# Altium integrated library StudentsLibrary.IntLib: 806 symbols (part 9 of 10)
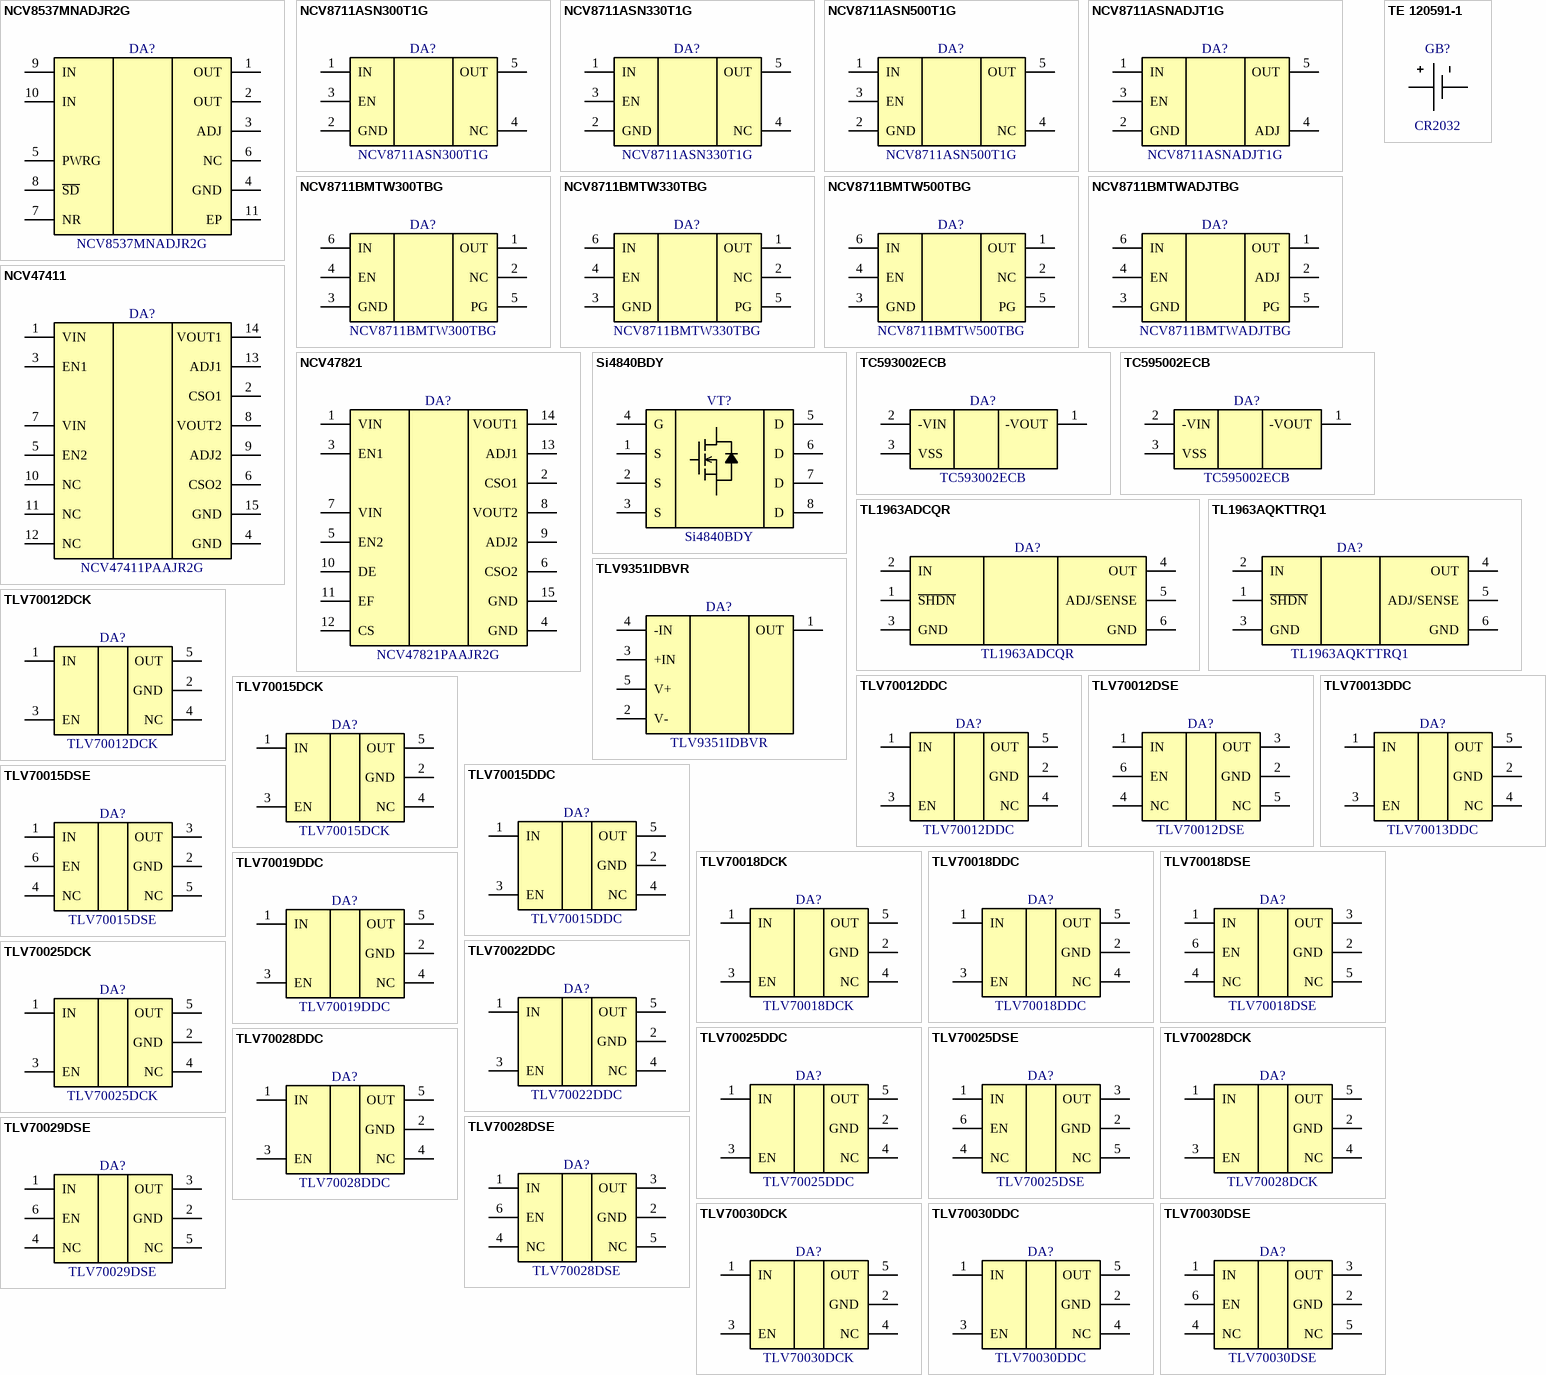
[diagram p55: symbols NCV8537MNADJR2G to TLV70030DSE]

## TE 120591-1
designator GB?, comment CR2032
Battery Holder, CR2032, Horizontal, Tin, PCB Mount Alignment; PartNumber: 120591-1; Manufacturer: TE Connectivity; BatteryType: CR2032; ComponentLink1Description: Product Page; ComponentLink1URL: https://www.te.com/usa-en/product-120591-1.html; ComponentLink2Description: DataSheet; ComponentLink2URL: https://www.te.com/usa-en/product-120591-1.datasheet.pdf
footprint TE 120591-1 (Lithium Battery Holder, CR2032, 2 Position, Horizontal, Tin, PCB Mount Alignment)
pins: 1, 2

## TL1963ADCQR
designator DA?
1.5-A, 20-V, low-dropout voltage regulator with reverse current & reverse voltage protection, Adj., SOT-223; Manufacturer: Texas Instruments; PartNumber: TL1963ADCQR; ComponentLink1Description: Product Page; ComponentLink1URL: https://www.ti.com/product/TL1963A; ComponentLink2Description: DataSheet; ComponentLink2URL: https://www.ti.com/lit/gpn/tl1963a
footprint SOT223-6P127_706X180L102X46N (Small Outline Transistor (SOT223), 1.27 mm pitch; 6 pin, 6.50 mm L X 3.50 mm W X 1.80 mm H body)
pins: 1 ~{SHDN}, 2 IN, 3 GND, 4 OUT, 5 ADJ/SENSE, 6 GND

## TL1963AQKTTRQ1
designator DA?
1.5-A Low-Noise Fast-Transient-Response Low-Dropout Regulator; Manufacturer: Texas Instruments; PartNumber: TL1963AQKTTRQ1; ComponentLink1Description: Product Page; ComponentLink1URL: https://www.ti.com/product/TL1963A-Q1; ComponentLink2Description: DataSheet; ComponentLink2URL: https://www.ti.com/lit/gpn/tl1963a-q1
footprint DPAK170P1525X485-6N (D2-PAK, 6-Pads, Body 7,93x8,71mm (max), IPC Medium Density)
pins: 1 ~{SHDN}, 2 IN, 3 GND, 4 OUT, 5 ADJ/SENSE, 6 GND

## TLV9351IDBVR
designator DA?
3.5-MHz, 40-V, RRO, MUX-Friendly Operational Amplifier / for Cost-Sensitive Systems, SOT-23; Manufacturer: Texas Instruments; PartNumber: TLV9351IDBVR; ComponentLink1Description: Product Page; ComponentLink1URL: https://www.ti.com/product/TLV9351; ComponentLink2Description: DataSheet; ComponentLink2URL: https://www.ti.com/lit/gpn/tlv9351
footprint SOT23-5P95_280X145L45X40N (Small Outline Transistor (SOT23), 0.95 mm pitch; 5 pin, 2.90 mm L X 1.60 mm W X 1.45 mm H body)
pins: 1 OUT, 2 V-, 3 +IN, 4 -IN, 5 V+

## TLV70012DCK
designator DA?
200-mA,Low-IQ, Low-Dropout Regulator for Portable Devices, Fixed 1.2 V, SC70; Manufacturer: Texas Instruments; PartNumber: TLV70012DCK; ComponentLink1Description: Product Page; ComponentLink1URL: https://www.ti.com/product/TLV700; ComponentLink2Description: DataSheet; ComponentLink2URL: https://www.ti.com/lit/gpn/tlv700
footprint SOT23-5P65_210X110L36X22N (Small Outline Transistor (SOT23), 0.65 mm pitch; 5 pin, 2.00 mm L X 1.25 mm W X 1.10 mm H body)
pins: 1 IN, 2 GND, 3 EN, 4 NC, 5 OUT

## TLV70012DDC
designator DA?
200-mA,Low-IQ, Low-Dropout Regulator for Portable Devices, Fixed 1.2 V, SOT-23-THIN; Manufacturer: Texas Instruments; PartNumber: TLV70012DDC; ComponentLink1Description: Product Page; ComponentLink1URL: https://www.ti.com/product/TLV700; ComponentLink2Description: DataSheet; ComponentLink2URL: https://www.ti.com/lit/gpn/tlv700
footprint SOT23-5P95_280X110L45X40N (Small Outline Transistor (SOT23), 0.95 mm pitch; 5 pin, 2.90 mm L X 1.60 mm W X 1.10 mm H body)
pins: 1 IN, 2 GND, 3 EN, 4 NC, 5 OUT

## TLV70012DSE
designator DA?
200-mA,Low-IQ, Low-Dropout Regulator for Portable Devices, Fixed 1.2 V, WSON-6; Manufacturer: Texas Instruments; PartNumber: TLV70012DSE; ComponentLink1Description: Product Page; ComponentLink1URL: https://www.ti.com/product/TLV700; ComponentLink2Description: DataSheet; ComponentLink2URL: https://www.ti.com/lit/gpn/tlv700
footprint SON6P50_150X150X80L50X25N (Small Outline No-Lead (SON), 0.50 mm pitch; 6 pin, 1.50 mm L X 1.50 mm W X 0.80 mm H body)
pins: 1 IN, 2 GND, 3 OUT, 4 NC, 5 NC, 6 EN

## TLV70013DDC
designator DA?
200-mA,Low-IQ, Low-Dropout Regulator for Portable Devices, Fixed 1.3 V, SOT-23-THIN; Manufacturer: Texas Instruments; PartNumber: TLV70013DDC; ComponentLink1Description: Product Page; ComponentLink1URL: https://www.ti.com/product/TLV700; ComponentLink2Description: DataSheet; ComponentLink2URL: https://www.ti.com/lit/gpn/tlv700
footprint SOT23-5P95_280X110L45X40N (Small Outline Transistor (SOT23), 0.95 mm pitch; 5 pin, 2.90 mm L X 1.60 mm W X 1.10 mm H body)
pins: 1 IN, 2 GND, 3 EN, 4 NC, 5 OUT

## TLV70015DCK
designator DA?
200-mA,Low-IQ, Low-Dropout Regulator for Portable Devices, Fixed 1.5 V, SC70; Manufacturer: Texas Instruments; PartNumber: TLV70015DCK; ComponentLink1Description: Product Page; ComponentLink1URL: https://www.ti.com/product/TLV700; ComponentLink2Description: DataSheet; ComponentLink2URL: https://www.ti.com/lit/gpn/tlv700
footprint SOT23-5P65_210X110L36X22N (Small Outline Transistor (SOT23), 0.65 mm pitch; 5 pin, 2.00 mm L X 1.25 mm W X 1.10 mm H body)
pins: 1 IN, 2 GND, 3 EN, 4 NC, 5 OUT

## TLV70015DDC
designator DA?
200-mA,Low-IQ, Low-Dropout Regulator for Portable Devices, Fixed 1.5 V, SOT-23-THIN; Manufacturer: Texas Instruments; PartNumber: TLV70015DDC; ComponentLink1Description: Product Page; ComponentLink1URL: https://www.ti.com/product/TLV700; ComponentLink2Description: DataSheet; ComponentLink2URL: https://www.ti.com/lit/gpn/tlv700
footprint SOT23-5P95_280X110L45X40N (Small Outline Transistor (SOT23), 0.95 mm pitch; 5 pin, 2.90 mm L X 1.60 mm W X 1.10 mm H body)
pins: 1 IN, 2 GND, 3 EN, 4 NC, 5 OUT

## TLV70015DSE
designator DA?
200-mA,Low-IQ, Low-Dropout Regulator for Portable Devices, Fixed 1.5 V, WSON-6; Manufacturer: Texas Instruments; PartNumber: TLV70015DSE; ComponentLink1Description: Product Page; ComponentLink1URL: https://www.ti.com/product/TLV700; ComponentLink2Description: DataSheet; ComponentLink2URL: https://www.ti.com/lit/gpn/tlv700
footprint SON6P50_150X150X80L50X25N (Small Outline No-Lead (SON), 0.50 mm pitch; 6 pin, 1.50 mm L X 1.50 mm W X 0.80 mm H body)
pins: 1 IN, 2 GND, 3 OUT, 4 NC, 5 NC, 6 EN

## TLV70018DCK
designator DA?
200-mA,Low-IQ, Low-Dropout Regulator for Portable Devices, Fixed 1.8 V, SC70; Manufacturer: Texas Instruments; PartNumber: TLV70018DCK; ComponentLink1Description: Product Page; ComponentLink1URL: https://www.ti.com/product/TLV700; ComponentLink2Description: DataSheet; ComponentLink2URL: https://www.ti.com/lit/gpn/tlv700
footprint SOT23-5P65_210X110L36X22N (Small Outline Transistor (SOT23), 0.65 mm pitch; 5 pin, 2.00 mm L X 1.25 mm W X 1.10 mm H body)
pins: 1 IN, 2 GND, 3 EN, 4 NC, 5 OUT

## TLV70018DDC
designator DA?
200-mA,Low-IQ, Low-Dropout Regulator for Portable Devices, Fixed 1.8 V, SOT-23-THIN; Manufacturer: Texas Instruments; PartNumber: TLV70018DDC; ComponentLink1Description: Product Page; ComponentLink1URL: https://www.ti.com/product/TLV700; ComponentLink2Description: DataSheet; ComponentLink2URL: https://www.ti.com/lit/gpn/tlv700
footprint SOT23-5P95_280X110L45X40N (Small Outline Transistor (SOT23), 0.95 mm pitch; 5 pin, 2.90 mm L X 1.60 mm W X 1.10 mm H body)
pins: 1 IN, 2 GND, 3 EN, 4 NC, 5 OUT

## TLV70018DSE
designator DA?
200-mA,Low-IQ, Low-Dropout Regulator for Portable Devices, Fixed 1.5 V, WSON-6; Manufacturer: Texas Instruments; PartNumber: TLV70018DSE; ComponentLink1Description: Product Page; ComponentLink1URL: https://www.ti.com/product/TLV700; ComponentLink2Description: DataSheet; ComponentLink2URL: https://www.ti.com/lit/gpn/tlv700
footprint SON6P50_150X150X80L50X25N (Small Outline No-Lead (SON), 0.50 mm pitch; 6 pin, 1.50 mm L X 1.50 mm W X 0.80 mm H body)
pins: 1 IN, 2 GND, 3 OUT, 4 NC, 5 NC, 6 EN

## TLV70019DDC
designator DA?
200-mA,Low-IQ, Low-Dropout Regulator for Portable Devices, Fixed 1.9 V, SOT-23-THIN; Manufacturer: Texas Instruments; PartNumber: TLV70019DDC; ComponentLink1Description: Product Page; ComponentLink1URL: https://www.ti.com/product/TLV700; ComponentLink2Description: DataSheet; ComponentLink2URL: https://www.ti.com/lit/gpn/tlv700
footprint SOT23-5P95_280X110L45X40N (Small Outline Transistor (SOT23), 0.95 mm pitch; 5 pin, 2.90 mm L X 1.60 mm W X 1.10 mm H body)
pins: 1 IN, 2 GND, 3 EN, 4 NC, 5 OUT

## TLV70022DDC
designator DA?
200-mA,Low-IQ, Low-Dropout Regulator for Portable Devices, Fixed 2.2 V, SOT-23-THIN; Manufacturer: Texas Instruments; PartNumber: TLV70022DDC; ComponentLink1Description: Product Page; ComponentLink1URL: https://www.ti.com/product/TLV700; ComponentLink2Description: DataSheet; ComponentLink2URL: https://www.ti.com/lit/gpn/tlv700
footprint SOT23-5P95_280X110L45X40N (Small Outline Transistor (SOT23), 0.95 mm pitch; 5 pin, 2.90 mm L X 1.60 mm W X 1.10 mm H body)
pins: 1 IN, 2 GND, 3 EN, 4 NC, 5 OUT

## TLV70025DCK
designator DA?
200-mA,Low-IQ, Low-Dropout Regulator for Portable Devices, Fixed 2.5 V, SC70; Manufacturer: Texas Instruments; PartNumber: TLV70025DCK; ComponentLink1Description: Product Page; ComponentLink1URL: https://www.ti.com/product/TLV700; ComponentLink2Description: DataSheet; ComponentLink2URL: https://www.ti.com/lit/gpn/tlv700
footprint SOT23-5P65_210X110L36X22N (Small Outline Transistor (SOT23), 0.65 mm pitch; 5 pin, 2.00 mm L X 1.25 mm W X 1.10 mm H body)
pins: 1 IN, 2 GND, 3 EN, 4 NC, 5 OUT

## TLV70025DDC
designator DA?
200-mA,Low-IQ, Low-Dropout Regulator for Portable Devices, Fixed 2.5 V, SOT-23-THIN; Manufacturer: Texas Instruments; PartNumber: TLV70025DDC; ComponentLink1Description: Product Page; ComponentLink1URL: https://www.ti.com/product/TLV700; ComponentLink2Description: DataSheet; ComponentLink2URL: https://www.ti.com/lit/gpn/tlv700
footprint SOT23-5P95_280X110L45X40N (Small Outline Transistor (SOT23), 0.95 mm pitch; 5 pin, 2.90 mm L X 1.60 mm W X 1.10 mm H body)
pins: 1 IN, 2 GND, 3 EN, 4 NC, 5 OUT

## TLV70025DSE
designator DA?
200-mA,Low-IQ, Low-Dropout Regulator for Portable Devices, Fixed 2.5 V, WSON-6; Manufacturer: Texas Instruments; PartNumber: TLV70025DSE; ComponentLink1Description: Product Page; ComponentLink1URL: https://www.ti.com/product/TLV700; ComponentLink2Description: DataSheet; ComponentLink2URL: https://www.ti.com/lit/gpn/tlv700
footprint SON6P50_150X150X80L50X25N (Small Outline No-Lead (SON), 0.50 mm pitch; 6 pin, 1.50 mm L X 1.50 mm W X 0.80 mm H body)
pins: 1 IN, 2 GND, 3 OUT, 4 NC, 5 NC, 6 EN

## TLV70028DCK
designator DA?
200-mA,Low-IQ, Low-Dropout Regulator for Portable Devices, Fixed 2.8 V, SC70; Manufacturer: Texas Instruments; PartNumber: TLV70028DCK; ComponentLink1Description: Product Page; ComponentLink1URL: https://www.ti.com/product/TLV700; ComponentLink2Description: DataSheet; ComponentLink2URL: https://www.ti.com/lit/gpn/tlv700
footprint SOT23-5P65_210X110L36X22N (Small Outline Transistor (SOT23), 0.65 mm pitch; 5 pin, 2.00 mm L X 1.25 mm W X 1.10 mm H body)
pins: 1 IN, 2 GND, 3 EN, 4 NC, 5 OUT

## TLV70028DDC
designator DA?
200-mA,Low-IQ, Low-Dropout Regulator for Portable Devices, Fixed 2.8 V, SOT-23-THIN; Manufacturer: Texas Instruments; PartNumber: TLV70028DDC; ComponentLink1Description: Product Page; ComponentLink1URL: https://www.ti.com/product/TLV700; ComponentLink2Description: DataSheet; ComponentLink2URL: https://www.ti.com/lit/gpn/tlv700
footprint SOT23-5P95_280X110L45X40N (Small Outline Transistor (SOT23), 0.95 mm pitch; 5 pin, 2.90 mm L X 1.60 mm W X 1.10 mm H body)
pins: 1 IN, 2 GND, 3 EN, 4 NC, 5 OUT

## TLV70028DSE
designator DA?
200-mA,Low-IQ, Low-Dropout Regulator for Portable Devices, Fixed 2.8 V, WSON-6; Manufacturer: Texas Instruments; PartNumber: TLV70028DSE; ComponentLink1Description: Product Page; ComponentLink1URL: https://www.ti.com/product/TLV700; ComponentLink2Description: DataSheet; ComponentLink2URL: https://www.ti.com/lit/gpn/tlv700
footprint SON6P50_150X150X80L50X25N (Small Outline No-Lead (SON), 0.50 mm pitch; 6 pin, 1.50 mm L X 1.50 mm W X 0.80 mm H body)
pins: 1 IN, 2 GND, 3 OUT, 4 NC, 5 NC, 6 EN

## TLV70029DSE
designator DA?
200-mA,Low-IQ, Low-Dropout Regulator for Portable Devices, Fixed 2.9 V, WSON-6; Manufacturer: Texas Instruments; PartNumber: TLV70029DSE; ComponentLink1Description: Product Page; ComponentLink1URL: https://www.ti.com/product/TLV700; ComponentLink2Description: DataSheet; ComponentLink2URL: https://www.ti.com/lit/gpn/tlv700
footprint SON6P50_150X150X80L50X25N (Small Outline No-Lead (SON), 0.50 mm pitch; 6 pin, 1.50 mm L X 1.50 mm W X 0.80 mm H body)
pins: 1 IN, 2 GND, 3 OUT, 4 NC, 5 NC, 6 EN

## TLV70030DCK
designator DA?
200-mA,Low-IQ, Low-Dropout Regulator for Portable Devices, Fixed 3.0 V, SC70; Manufacturer: Texas Instruments; PartNumber: TLV70030DCK; ComponentLink1Description: Product Page; ComponentLink1URL: https://www.ti.com/product/TLV700; ComponentLink2Description: DataSheet; ComponentLink2URL: https://www.ti.com/lit/gpn/tlv700
footprint SOT23-5P65_210X110L36X22N (Small Outline Transistor (SOT23), 0.65 mm pitch; 5 pin, 2.00 mm L X 1.25 mm W X 1.10 mm H body)
pins: 1 IN, 2 GND, 3 EN, 4 NC, 5 OUT

## TLV70030DDC
designator DA?
200-mA,Low-IQ, Low-Dropout Regulator for Portable Devices, Fixed 3.0 V, SOT-23-THIN; Manufacturer: Texas Instruments; PartNumber: TLV70030DDC; ComponentLink1Description: Product Page; ComponentLink1URL: https://www.ti.com/product/TLV700; ComponentLink2Description: DataSheet; ComponentLink2URL: https://www.ti.com/lit/gpn/tlv700
footprint SOT23-5P95_280X110L45X40N (Small Outline Transistor (SOT23), 0.95 mm pitch; 5 pin, 2.90 mm L X 1.60 mm W X 1.10 mm H body)
pins: 1 IN, 2 GND, 3 EN, 4 NC, 5 OUT

## TLV70030DSE
designator DA?
200-mA,Low-IQ, Low-Dropout Regulator for Portable Devices, Fixed 3.0 V, WSON-6; Manufacturer: Texas Instruments; PartNumber: TLV70030DSE; ComponentLink1Description: Product Page; ComponentLink1URL: https://www.ti.com/product/TLV700; ComponentLink2Description: DataSheet; ComponentLink2URL: https://www.ti.com/lit/gpn/tlv700
footprint SON6P50_150X150X80L50X25N (Small Outline No-Lead (SON), 0.50 mm pitch; 6 pin, 1.50 mm L X 1.50 mm W X 0.80 mm H body)
pins: 1 IN, 2 GND, 3 OUT, 4 NC, 5 NC, 6 EN

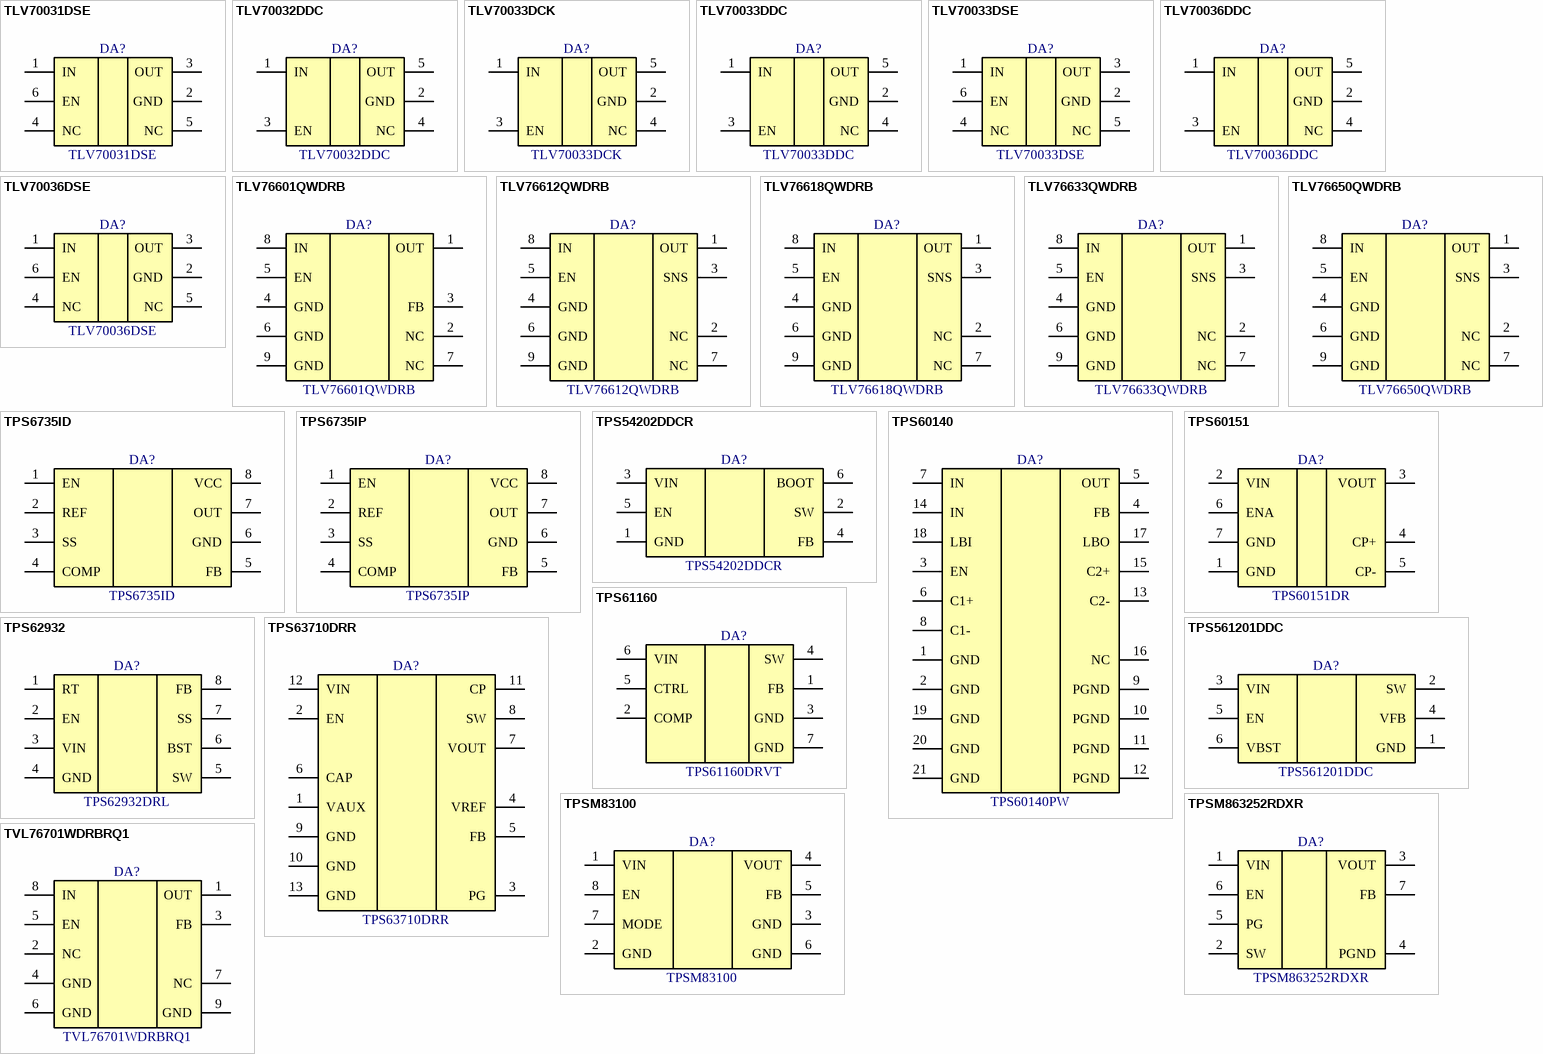
[diagram p37: symbols TLV70031DSE to TVL76701WDRBRQ1]

## TLV70031DSE
designator DA?
200-mA,Low-IQ, Low-Dropout Regulator for Portable Devices, Fixed 3.1 V, WSON-6; Manufacturer: Texas Instruments; PartNumber: TLV70031DSE; ComponentLink1Description: Product Page; ComponentLink1URL: https://www.ti.com/product/TLV700; ComponentLink2Description: DataSheet; ComponentLink2URL: https://www.ti.com/lit/gpn/tlv700
footprint SON6P50_150X150X80L50X25N (Small Outline No-Lead (SON), 0.50 mm pitch; 6 pin, 1.50 mm L X 1.50 mm W X 0.80 mm H body)
pins: 1 IN, 2 GND, 3 OUT, 4 NC, 5 NC, 6 EN

## TLV70032DDC
designator DA?
200-mA,Low-IQ, Low-Dropout Regulator for Portable Devices, Fixed 3.2 V, SOT-23-THIN; Manufacturer: Texas Instruments; PartNumber: TLV70032DDC; ComponentLink1Description: Product Page; ComponentLink1URL: https://www.ti.com/product/TLV700; ComponentLink2Description: DataSheet; ComponentLink2URL: https://www.ti.com/lit/gpn/tlv700
footprint SOT23-5P95_280X110L45X40N (Small Outline Transistor (SOT23), 0.95 mm pitch; 5 pin, 2.90 mm L X 1.60 mm W X 1.10 mm H body)
pins: 1 IN, 2 GND, 3 EN, 4 NC, 5 OUT

## TLV70033DCK
designator DA?
200-mA,Low-IQ, Low-Dropout Regulator for Portable Devices, Fixed 3.3 V, SC70; Manufacturer: Texas Instruments; PartNumber: TLV70033DCK; ComponentLink1Description: Product Page; ComponentLink1URL: https://www.ti.com/product/TLV700; ComponentLink2Description: DataSheet; ComponentLink2URL: https://www.ti.com/lit/gpn/tlv700
footprint SOT23-5P65_210X110L36X22N (Small Outline Transistor (SOT23), 0.65 mm pitch; 5 pin, 2.00 mm L X 1.25 mm W X 1.10 mm H body)
pins: 1 IN, 2 GND, 3 EN, 4 NC, 5 OUT

## TLV70033DDC
designator DA?
200-mA,Low-IQ, Low-Dropout Regulator for Portable Devices, Fixed 3.3 V, SOT-23-THIN; Manufacturer: Texas Instruments; PartNumber: TLV70033DDC; ComponentLink1Description: Product Page; ComponentLink1URL: https://www.ti.com/product/TLV700; ComponentLink2Description: DataSheet; ComponentLink2URL: https://www.ti.com/lit/gpn/tlv700
footprint SOT23-5P95_280X110L45X40N (Small Outline Transistor (SOT23), 0.95 mm pitch; 5 pin, 2.90 mm L X 1.60 mm W X 1.10 mm H body)
pins: 1 IN, 2 GND, 3 EN, 4 NC, 5 OUT

## TLV70033DSE
designator DA?
200-mA,Low-IQ, Low-Dropout Regulator for Portable Devices, Fixed 3.3 V, WSON-6; Manufacturer: Texas Instruments; PartNumber: TLV70033DSE; ComponentLink1Description: Product Page; ComponentLink1URL: https://www.ti.com/product/TLV700; ComponentLink2Description: DataSheet; ComponentLink2URL: https://www.ti.com/lit/gpn/tlv700
footprint SON6P50_150X150X80L50X25N (Small Outline No-Lead (SON), 0.50 mm pitch; 6 pin, 1.50 mm L X 1.50 mm W X 0.80 mm H body)
pins: 1 IN, 2 GND, 3 OUT, 4 NC, 5 NC, 6 EN

## TLV70036DDC
designator DA?
200-mA,Low-IQ, Low-Dropout Regulator for Portable Devices, Fixed 3.6 V, SOT-23-THIN; Manufacturer: Texas Instruments; PartNumber: TLV70036DDC; ComponentLink1Description: Product Page; ComponentLink1URL: https://www.ti.com/product/TLV700; ComponentLink2Description: DataSheet; ComponentLink2URL: https://www.ti.com/lit/gpn/tlv700
footprint SOT23-5P95_280X110L45X40N (Small Outline Transistor (SOT23), 0.95 mm pitch; 5 pin, 2.90 mm L X 1.60 mm W X 1.10 mm H body)
pins: 1 IN, 2 GND, 3 EN, 4 NC, 5 OUT

## TLV70036DSE
designator DA?
200-mA,Low-IQ, Low-Dropout Regulator for Portable Devices, Fixed 3.6 V, WSON-6; Manufacturer: Texas Instruments; PartNumber: TLV70036DSE; ComponentLink1Description: Product Page; ComponentLink1URL: https://www.ti.com/product/TLV700; ComponentLink2Description: DataSheet; ComponentLink2URL: https://www.ti.com/lit/gpn/tlv700
footprint SON6P50_150X150X80L50X25N (Small Outline No-Lead (SON), 0.50 mm pitch; 6 pin, 1.50 mm L X 1.50 mm W X 0.80 mm H body)
pins: 1 IN, 2 GND, 3 OUT, 4 NC, 5 NC, 6 EN

## TLV76601QWDRB
designator DA?
500-mA, 16-V Linear Voltage Regulator Adjustable  Version, LDO; Manufacturer: Texas Instruments; PartNumber: TLV76601QWDRB; ComponentLink1Description: Product Page; ComponentLink1URL: https://www.ti.com/product/TLV766-Q1; ComponentLink2Description: DataSheet; ComponentLink2URL: https://www.ti.com/lit/gpn/tlv766-q1
footprint SON9P65_300X300X100L40X31T240X165N (Small Outline No-Lead (SON with Tab), 0.65 mm pitch; 8 pin, 3.00 mm L X 3.00 mm W X 1.00 mm H body)
pins: 1 OUT, 2 NC, 3 FB, 4 GND, 5 EN, 6 GND, 7 NC, 8 IN, 9 GND

## TLV76612QWDRB
designator DA?
500-mA, 16-V Linear Voltage Regulator, Fixed  Version 1.2 V, LDO; Manufacturer: Texas Instruments; PartNumber: TLV76612QWDRB; ComponentLink1Description: Product Page; ComponentLink1URL: https://www.ti.com/product/TLV766-Q1; ComponentLink2Description: DataSheet; ComponentLink2URL: https://www.ti.com/lit/gpn/tlv766-q1
footprint SON9P65_300X300X100L40X31T240X165N (Small Outline No-Lead (SON with Tab), 0.65 mm pitch; 8 pin, 3.00 mm L X 3.00 mm W X 1.00 mm H body)
pins: 1 OUT, 2 NC, 3 SNS, 4 GND, 5 EN, 6 GND, 7 NC, 8 IN, 9 GND

## TLV76618QWDRB
designator DA?
500-mA, 16-V Linear Voltage Regulator, Fixed  Version 1.8 V, LDO; Manufacturer: Texas Instruments; PartNumber: TLV76618QWDRB; ComponentLink1Description: Product Page; ComponentLink1URL: https://www.ti.com/product/TLV766-Q1; ComponentLink2Description: DataSheet; ComponentLink2URL: https://www.ti.com/lit/gpn/tlv766-q1
footprint SON9P65_300X300X100L40X31T240X165N (Small Outline No-Lead (SON with Tab), 0.65 mm pitch; 8 pin, 3.00 mm L X 3.00 mm W X 1.00 mm H body)
pins: 1 OUT, 2 NC, 3 SNS, 4 GND, 5 EN, 6 GND, 7 NC, 8 IN, 9 GND

## TLV76633QWDRB
designator DA?
500-mA, 16-V Linear Voltage Regulator, Fixed  Version 3.3 V, LDO; Manufacturer: Texas Instruments; PartNumber: TLV76633QWDRB; ComponentLink1Description: Product Page; ComponentLink1URL: https://www.ti.com/product/TLV766-Q1; ComponentLink2Description: DataSheet; ComponentLink2URL: https://www.ti.com/lit/gpn/tlv766-q1
footprint SON9P65_300X300X100L40X31T240X165N (Small Outline No-Lead (SON with Tab), 0.65 mm pitch; 8 pin, 3.00 mm L X 3.00 mm W X 1.00 mm H body)
pins: 1 OUT, 2 NC, 3 SNS, 4 GND, 5 EN, 6 GND, 7 NC, 8 IN, 9 GND

## TLV76650QWDRB
designator DA?
500-mA, 16-V Linear Voltage Regulator, Fixed  Version 5.0 V, LDO; Manufacturer: Texas Instruments; PartNumber: TLV76650QWDRB; ComponentLink1Description: Product Page; ComponentLink1URL: https://www.ti.com/product/TLV766-Q1; ComponentLink2Description: DataSheet; ComponentLink2URL: https://www.ti.com/lit/gpn/tlv766-q1
footprint SON9P65_300X300X100L40X31T240X165N (Small Outline No-Lead (SON with Tab), 0.65 mm pitch; 8 pin, 3.00 mm L X 3.00 mm W X 1.00 mm H body)
pins: 1 OUT, 2 NC, 3 SNS, 4 GND, 5 EN, 6 GND, 7 NC, 8 IN, 9 GND

## TPS6735ID
designator DA?
Fixed Negative 5-V 200-MA Inverting DC/DC Converter; Manufacturer: Texas Instruments; PartNumber: TPS6735ID; ComponentLink1Description: Product Page; ComponentLink1URL: https://www.ti.com/product/TPS6735; ComponentLink2Description: DataSheet; ComponentLink2URL: https://www.ti.com/lit/gpn/tps6735
footprint SOIC8P127_490X600X175L76X43N (Small Outline IC (SOIC), 1.27 mm pitch; 8 pin, 4.90 mm L X 3.90 mm W X 1.75 mm H body)
pins: 1 EN, 2 REF, 3 SS, 4 COMP, 5 FB, 6 GND, 7 OUT, 8 VCC

## TPS6735IP
designator DA?
Fixed Negative 5-V 200-MA Inverting DC/DC Converter; Manufacturer: Texas Instruments; PartNumber: TPS6735IP; ComponentLink1Description: Product Page; ComponentLink1URL: https://www.ti.com/product/TPS6735; ComponentLink2Description: DataSheet; ComponentLink2URL: https://www.ti.com/lit/gpn/tps6735
footprint R-PDIP-T8_TI
pins: 1 EN, 2 REF, 3 SS, 4 COMP, 5 FB, 6 GND, 7 OUT, 8 VCC

## TPS54202DDCR
designator DA?
4.5-V to 28-V Input, 2-A Output, EMI Friendly / Synchronous Step Down Converter; Manufacturer: Texas Instruments; PartNumber: TPS54202DDCR; ComponentLink1Description: Product Page; ComponentLink1URL: https://www.ti.com/product/TPS54202; ComponentLink2Description: DataSheet; ComponentLink2URL: https://www.ti.com/lit/gpn/tps54202
footprint SOT23-6P95_280X110L45X40N (Small Outline Transistor (SOT23), 0.95 mm pitch; 6 pin, 2.90 mm L X 1.60 mm W X 1.10 mm H body)
pins: 1 GND, 2 SW, 3 VIN, 4 FB, 5 EN, 6 BOOT

## TPS60140
designator DA?, comment TPS60140PW
Regulated 5-V Charge Pump Voltage Tripler With Low Battery Indicator; Manufacturer: Texas Instruments; PartNumber: TPS60140PW; ComponentLink1Description: Product Page; ComponentLink1URL: https://www.ti.com/product/TPS60140; ComponentLink2Description: DataSheet; ComponentLink2URL: https://www.ti.com/lit/gpn/tps60140
footprint SOP21P65_650X640X120L62X24T270X195N (Small Outline Pkg (SOP with Tab), 0.65 mm pitch; 20 pin, 6.50 mm L X 4.40 mm W X 1.20 mm H body)
pins: 1 GND, 2 GND, 3 EN, 4 FB, 5 OUT, 6 C1+, 7 IN, 8 C1-, 9 PGND, 10 PGND, 11 PGND, 12 PGND, 13 C2-, 14 IN, 15 C2+, 16 NC, 17 LBO, 18 LBI, 19 GND, 20 GND, 21 GND

## TPS60151
designator DA?, comment TPS60151DR
5-V and 140-mA Charge Pump; Manufacturer: Texas Instruments; PartNumber: TPS60151DR; ComponentLink1Description: Product Page; ComponentLink1URL: https://www.ti.com/product/TPS60151; ComponentLink2Description: DataSheet; ComponentLink2URL: https://www.ti.com/lit/gpn/tps60151
footprint SON7P65_200X200X80L25X30T160X100N (Small Outline No-Lead (SON with Tab), 0.65 mm pitch; 6 pin, 2.00 mm L X 2.00 mm W X 0.80 mm H body)
pins: 1 GND, 2 VIN, 3 VOUT, 4 CP+, 5 CP-, 6 ENA, 7 GND

## TPS61160
designator DA?, comment TPS61160DRVT
TPS61160 White LED Drivers With Digital and PWM Brightness Control in 2-mm x 2-mm / WSON Package, 28 V typ; Manufacturer: Texas Instruments; PartNumber: TPS61160DRVT; ComponentLink1Description: Product Page; ComponentLink1URL: https://www.ti.com/product/TPS61161; ComponentLink2Description: Manufacturer; ComponentLink2URL: Texas Instruments
footprint SON7P65_200X200X80L25X30T160X100N (Small Outline No-Lead (SON with Tab), 0.65 mm pitch; 6 pin, 2.00 mm L X 2.00 mm W X 0.80 mm H body)
pins: 1 FB, 2 COMP, 3 GND, 4 SW, 5 CTRL, 6 VIN, 7 GND

## TPS62932
designator DA?, comment TPS62932DRL
3.8-V to 30-V, 2-A, 3-A Synchronous Buck Converters in a SOT583 Package; Manufacturer: Texas Instruments; PartNumber: TPS62932DRL; ComponentLink1Description: Product Page; ComponentLink1URL: https://www.ti.com/product/TPS62933P; ComponentLink2Description: DataSheet; ComponentLink2URL: https://www.ti.com/lit/gpn/tps62933p
footprint ICSOFL8P50_210X160X60L30X22N (Integrated Circuit (IC), Small Outline Flat Lead (SOFL), 0.50 mm pitch; 8 pin, 2.10 mm L X 1.20 mm W X 0.60 mm H body)
pins: 1 RT, 2 EN, 3 VIN, 4 GND, 5 SW, 6 BST, 7 SS, 8 FB

## TPS63710DRR
designator DA?
Low Noise, 1A Synchronous Inverting Buck Converter in 3x3 WSON Package; Manufacturer: Texas Instruments; PartNumber: TPS63710DRR; ComponentLink1Description: Product Page; ComponentLink1URL: https://www.ti.com/product/TPS63710; ComponentLink2Description: DataSheet; ComponentLink2URL: https://www.ti.com/lit/gpn/tps63710
footprint SON13P50_300X300X80L40X25T250X150N (Small Outline No-Lead (SON with Tab), 0.50 mm pitch; 12 pin, 3.00 mm L X 3.00 mm W X 0.80 mm H body)
pins: 1 VAUX, 2 EN, 3 PG, 4 VREF, 5 FB, 6 CAP, 7 VOUT, 8 SW, 9 GND, 10 GND, 11 CP, 12 VIN, 13 GND

## TPS561201DDC
designator DA?
Manufacturer: Texas Instruments; PartNumber: TPS561201DDC; ComponentLink1Description: Product Page; ComponentLink1URL: https://www.ti.com/product/TPS561201; ComponentLink2Description: DataSheet; ComponentLink2URL: https://www.ti.com/lit/gpn/tps561201
footprint SOT23-6P95_280X110L45X40N (Small Outline Transistor (SOT23), 0.95 mm pitch; 6 pin, 2.90 mm L X 1.60 mm W X 1.10 mm H body)
pins: 1 GND, 2 SW, 3 VIN, 4 VFB, 5 EN, 6 VBST

## TPSM83100
designator DA?
1.5-A Output Current, Buck-Boost MicroSiP™ Power Module with Integrated Inductor; Manufacturer: Texas Instruments; PartNumber: TPSM83100; ComponentLink1Description: Product Page; ComponentLink1URL: https://www.ti.com/product/TPSM83100; ComponentLink2Description: DataSheet; ComponentLink2URL: https://www.ti.com/lit/gpn/tpsm83100
footprint TI MICROSIP8 (MicroSiP - 1.2 mm max height)
pins: 1 VIN, 2 GND, 3 GND, 4 VOUT, 5 FB, 6 GND, 7 MODE, 8 EN

## TPSM863252RDXR
designator DA?
TPSM86325x 3V to 17V Input, 3A, Synchronous Buck Module in QFN Package; Manufacturer: Texas Instruments; PartNumber: TPSM863252RDXR; ComponentLink1Description: Product Page; ComponentLink1URL: https://www.ti.com/product/TPSM863252; ComponentLink2Description: DataSheet; ComponentLink2URL: https://www.ti.com/lit/gpn/tpsm863252
footprint TPSM863252RDXR (TI QFN-FCMOD - 3.3 mmx4 mm, 2.1 mm max height)
footprint TPSM863252RDXR_Via0402 (TI QFN-FCMOD - 3.3 mm x 4 mm, 2.1 mm max height, with recommended vias)
pins: 1 VIN, 2 SW, 3 VOUT, 4 PGND, 5 PG, 6 EN, 7 FB

## TVL76701WDRBRQ1
designator DA?
1-A, 16-V Linear Voltage Regulator, Adj.; Manufacturer: Texas Instruments; PartNumber: TVL76701WDRBRQ1; ComponentLink1Description: ProductPage; ComponentLink1URL: https://www.ti.com/product/TLV767-Q1; ComponentLink2Description: DataSheet; ComponentLink2URL: https://www.ti.com/lit/gpn/tlv767-q1
footprint TI DRB0008J (VSON - 1 mm max height, 3x3)
pins: 1 OUT, 2 NC, 3 FB, 4 GND, 5 EN, 6 GND, 7 NC, 8 IN, 9 GND


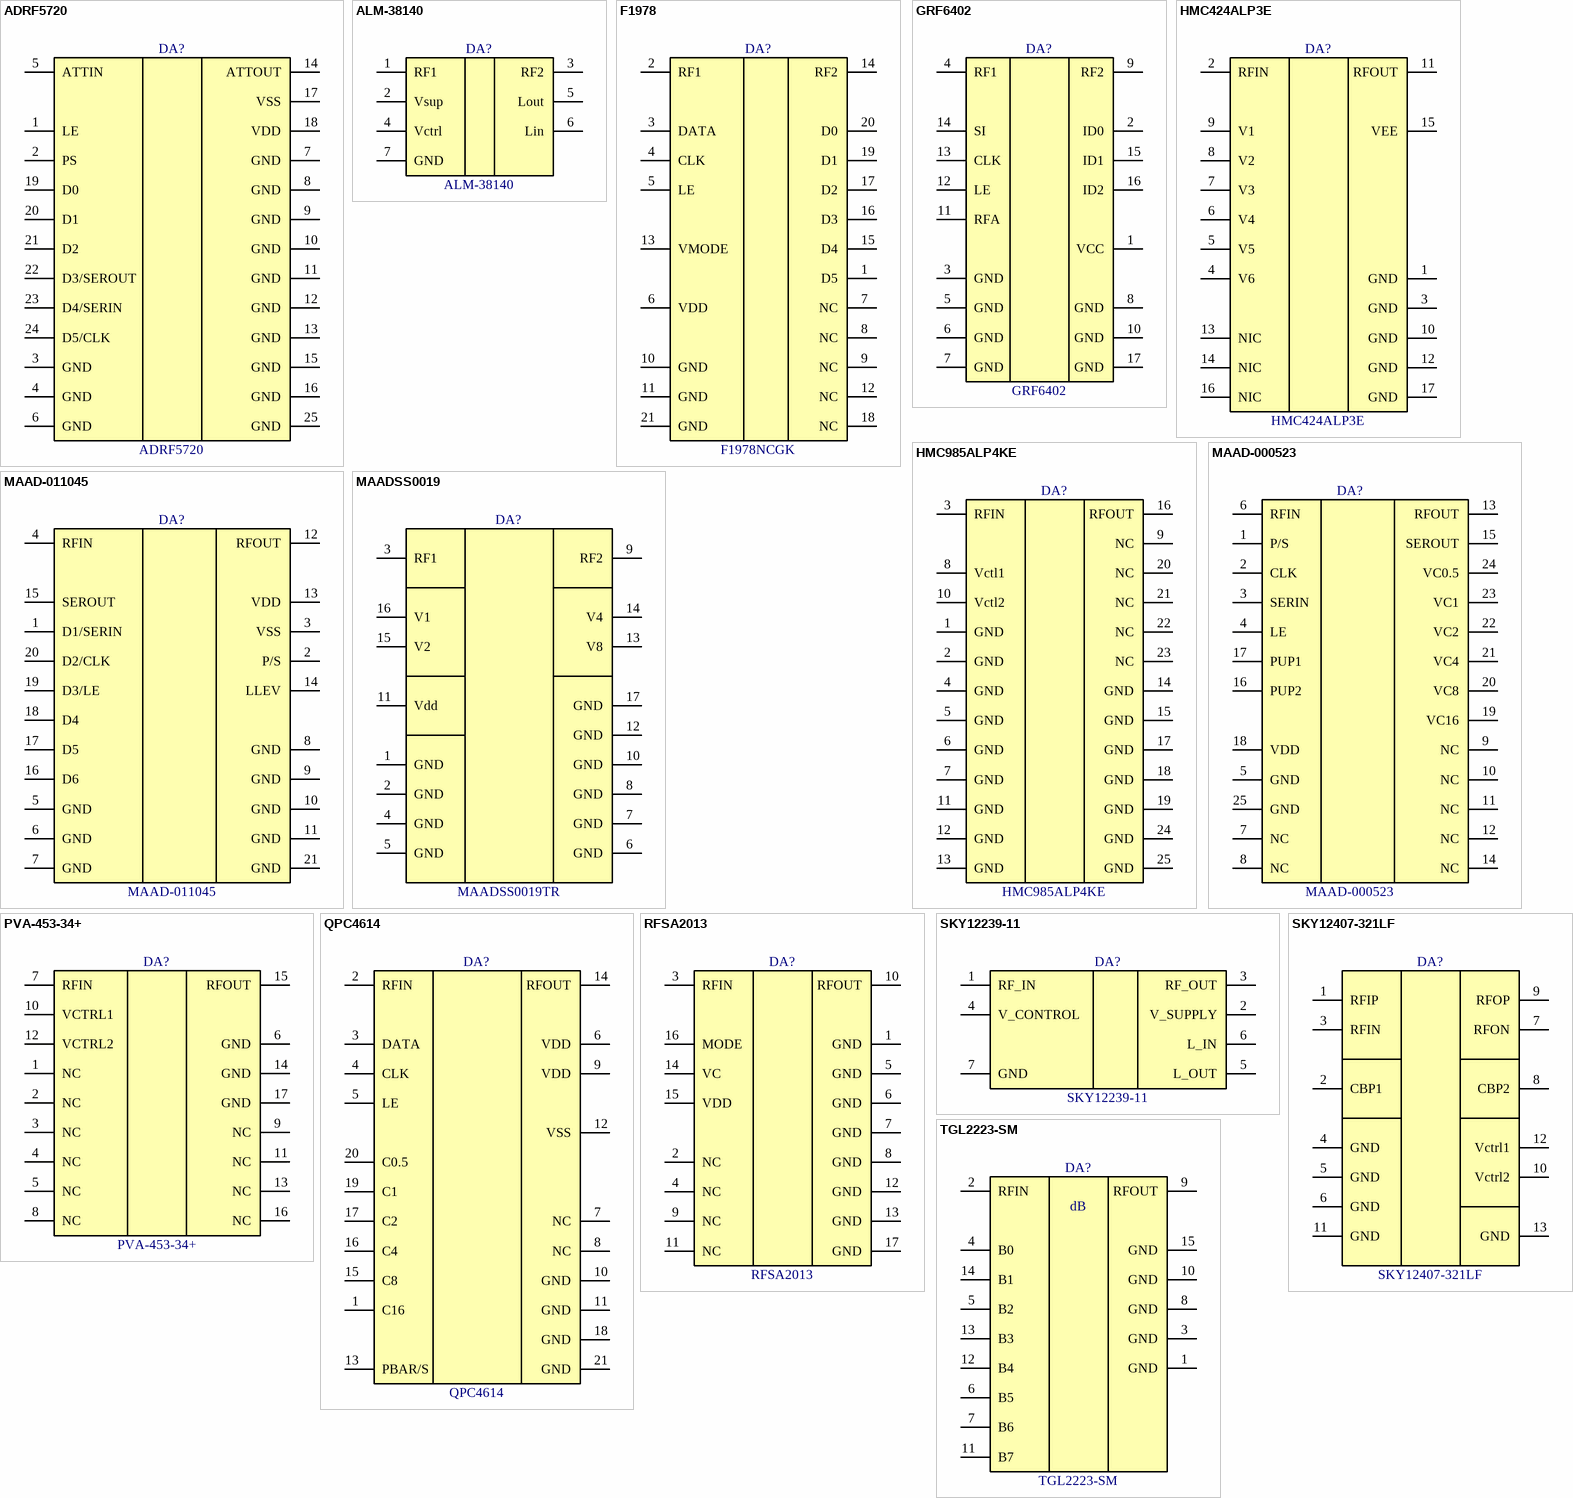
[diagram p38: symbols ADRF5720 to TGL2223-SM]

## ADRF5720
designator DA?
0.5 dB LSB, 6-Bit, Silicon Digital Attenuator, 9 kHz to 40 GHz; Manufacturer: Analog Devices; PartNumber: ADRF5720; ComponentLink1Description: Product Page; ComponentLink1URL: https://www.analog.com/en/products/adrf5720.html; ComponentLink2Description: DataSheet; ComponentLink2URL: https://www.analog.com/media/en/technical-documentation/data-sheets/adrf5720.pdf
footprint QFN50P400X400X85_HS-25N (QFN, 24-Leads, Body 4.00x4.00mm, Pitch 0.50mm, Thermal Pad 2.40x2.40mm, IPC Medium Density)
pins: 1 LE, 2 PS, 3 GND, 4 GND, 5 ATTIN, 6 GND, 7 GND, 8 GND, 9 GND, 10 GND, 11 GND, 12 GND, 13 GND, 14 ATTOUT, 15 GND, 16 GND, 17 VSS, 18 VDD, 19 D0, 20 D1, 21 D2, 22 D3/SEROUT, 23 D4/SERIN, 24 D5/CLK, 25 GND

## ALM-38140
designator DA?
50MHz – 4GHz PIN Diode Variable Attenuator Module; Manufacturer: Broadcom; PartNumber: ALM-38140; ComponentLink1Description: Product Page; ComponentLink1URL: https://www.broadcom.com/products/wireless/diodes/attenuator/alm-38140
footprint ALM-38140 (AVAGO ALM-38140)
pins: 1 RF1, 2 Vsup, 3 RF2, 4 Vctrl, 5 Lout, 6 Lin, 7 GND

## F1978
designator DA?, comment F1978NCGK
6-Bit, 75Ω Digital Step Attenuator 5MHz to 3GHz; Manufacturer: Renesas; PartNumber: F1978NCGK; ComponentLink1Description: Product Page; ComponentLink1URL: https://www.renesas.com/us/en/products/rf-products/rf-attenuators/f1978-6-bit-05db-75ohm-glitch-free-digital-step-attenuator; ComponentLink2Description: DataSheet; ComponentLink2URL: https://www.renesas.com/us/en/document/dst/f1978-datasheet-revision-o?r=366161
footprint QFN21P50_400X400X80L55X25T206N (Quad Flat No-Lead (QFN with Tab), 0.50 mm pitch; square, 5 pin X 5 pin, 4.00 mm L X 4.00 mm W X 0.80 mm H body)
pins: 1 D5, 2 RF1, 3 DATA, 4 CLK, 5 LE, 6 VDD, 7 NC, 8 NC, 9 NC, 10 GND, 11 GND, 12 NC, 13 VMODE, 14 RF2, 15 D4, 16 D3, 17 D2, 18 NC, 19 D1, 20 D0, 21 GND

## GRF6402
designator DA?
0.25dB Step DSA 50 MHz to 6 GHz; Manufacturer: Guerilla-RF; PartNumber: GRF6402
footprint GRF6402 (Guerrilla-RF 3.0 mm QFN-16)
pins: 1 VCC, 2 ID0, 3 GND, 4 RF1, 5 GND, 6 GND, 7 GND, 8 GND, 9 RF2, 10 GND, 11 RFA, 12 LE, 13 CLK, 14 SI, 15 ID1, 16 ID2, 17 GND

## HMC424ALP3E
designator DA?
0.1 GHz to 13.0 GHz, 0.5 dB LSB, 6-Bit, GaAs Digital Attenuator; Manufacturer: Analog Devices; PartNumber: HMC424ALP3E; ComponentLink1Description: Product Page; ComponentLink1URL: https://www.analog.com/en/products/HMC424ALP3E.html; ComponentLink2Description: DataSheet; ComponentLink2URL: https://www.analog.com/media/en/technical-documentation/data-sheets/hmc424alp3e.pdf
footprint QFN17P50_300X300X90L30X25T170N (Quad Flat No-Lead (QFN with Tab), 0.50 mm pitch; square, 4 pin X 4 pin, 3.00 mm L X 3.00 mm W X 0.90 mm H body)
pins: 1 GND, 2 RFIN, 3 GND, 4 V6, 5 V5, 6 V4, 7 V3, 8 V2, 9 V1, 10 GND, 11 RFOUT, 12 GND, 13 NIC, 14 NIC, 15 VEE, 16 NIC, 17 GND

## HMC985ALP4KE
designator DA?
GaAs MMIC VOLTAGE - VARIABLE ATTENUATOR, 10 - 40 GHz; Manufacturer: Analog Devices; ComponentLink1Description: Product Page; ComponentLink1URL: https://www.analog.com/en/products/hmc985alp4ke.html; PartNumber: HMC985ALP4KE; ComponentLink2Description: DataSheet; ComponentLink2URL: https://www.analog.com/media/en/technical-documentation/data-sheets/hmc985ALP4KE.pdf
footprint QFN25P50_400X400X100L40X24T260N (Quad Flat No-Lead (QFN with Tab), 0.50 mm pitch; square, 6 pin X 6 pin, 4.00 mm L X 4.00 mm W X 1.00 mm H body)
pins: 1 GND, 2 GND, 3 RFIN, 4 GND, 5 GND, 6 GND, 7 GND, 8 Vctl1, 9 NC, 10 Vctl2, 11 GND, 12 GND, 13 GND, 14 GND, 15 GND, 16 RFOUT, 17 GND, 18 GND, 19 GND, 20 NC, 21 NC, 22 NC, 23 NC, 24 GND, 25 GND

## MAAD-000523
designator DA?
6-Bit Digital Attenuator; Manufacturer: MACOM; PartNumber: MAAD-000523; ComponentLink1Description: Product Page; ComponentLink1URL: https://www.macom.com/products/product-detail/MAAD-000523; ComponentLink2Description: DataSheet; ComponentLink2URL: https://cdn.macom.com/datasheets/MAAD-000523.pdf
footprint QFN25P50_400X400X100L40X24T245N (Quad Flat No-Lead (QFN with Tab), 0.50 mm pitch; square, 6 pin X 6 pin, 4.00 mm L X 4.00 mm W X 1.00 mm H body)
pins: 1 P/S, 2 CLK, 3 SERIN, 4 LE, 5 GND, 6 RFIN, 7 NC, 8 NC, 9 NC, 10 NC, 11 NC, 12 NC, 13 RFOUT, 14 NC, 15 SEROUT, 16 PUP2, 17 PUP1, 18 VDD, 19 VC16, 20 VC8, 21 VC4, 22 VC2, 23 VC1, 24 VC0.5, 25 GND

## MAAD-011045
designator DA?
Digital Attenuator, 0.5 dB LSB, 6-Bit, Consistent Phase 31.5 dB, DC - 18 GHz; Manufacturer: MACOM; PartNumber: MAAD-011045; ComponentLink1Description: Product Page; ComponentLink1URL: https://www.macom.com/products/product-detail/MAAD-011045; ComponentLink2Description: DataSheet; ComponentLink2URL: https://cdn.macom.com/datasheets/MAAD-011045.pdf
footprint QFN21P40_300X300X95L38X20T160N (Quad Flat No-Lead (QFN with Tab), 0.40 mm pitch; square, 5 pin X 5 pin, 3.00 mm L X 3.00 mm W X 0.95 mm H body)
pins: 1 D1/SERIN, 2 P/S, 3 VSS, 4 RFIN, 5 GND, 6 GND, 7 GND, 8 GND, 9 GND, 10 GND, 11 GND, 12 RFOUT, 13 VDD, 14 LLEV, 15 SEROUT, 16 D6, 17 D5, 18 D4, 19 D3/LE, 20 D2/CLK, 21 GND

## MAADSS0019
designator DA?, comment MAADSS0019TR
Digital Attenuator, 15 dB, 4-Bit; Manufacturer: MACOM; ComponentLink1Description: Product Page; ComponentLink1URL: https://www.macom.com/products/product-detail/MAADSS0019; PartNumber: MAADSS0019TR; ComponentLink2Description: DataSheet; ComponentLink2URL: https://cdn.macom.com/datasheets/MAADSS0019.pdf
footprint PQFN50P300X300X100_HS-17N (PQFN, 16-Leads, Body 3,00x3,00mm, Pitch 0,50mm, Thermal Pad 1,43x1,43mm, IPC Medium Density)
pins: 1 GND, 2 GND, 3 RF1, 4 GND, 5 GND, 6 GND, 7 GND, 8 GND, 9 RF2, 10 GND, 11 Vdd, 12 GND, 13 V8, 14 V4, 15 V2, 16 V1, 17 GND

## PVA-453-34+
designator DA?
SMT Voltage Variable Attenuator, 10000 - 45000 MHz, 50Ω; Manufacturer: Mini-Circuits; PartNumber: PVA-453-34+; ComponentLink1Description: Product Page; ComponentLink1URL: https://www.minicircuits.com/WebStore/dashboard.html?model=PVA-453-34%2B; ComponentLink2Description: DataSheet; ComponentLink2URL: https://www.minicircuits.com/WebStore/dashboardPdf?model=PVA-453-34%2B
footprint JV2579 (Mini-Circuits CASE JV2579)
pins: 1 NC, 2 NC, 3 NC, 4 NC, 5 NC, 6 GND, 7 RFIN, 8 NC, 9 NC, 10 VCTRL1, 11 NC, 12 VCTRL2, 13 NC, 14 GND, 15 RFOUT, 16 NC, 17 GND

## QPC4614
designator DA?
75Ω 5 −2000MHz Digital Step Attenuator; Manufacturer: Qorvo; PartNumber: QPC4614; ComponentLink1Description: ProductPage; ComponentLink1URL: https://www.qorvo.com/products/p/QPC4614; ComponentLink2Description: DataSheet; ComponentLink2URL: https://www.qorvo.com/products/d/da008166
footprint QFN50P400X400X90_HS-21N (QFN, 20-Leads, Body 4,00x4,00mm, Pitch 0,50mm, Thermal Pad 2,15x2,15mm, IPC Medium Density)
pins: 1 C16, 2 RFIN, 3 DATA, 4 CLK, 5 LE, 6 VDD, 7 NC, 8 NC, 9 VDD, 10 GND, 11 GND, 12 VSS, 13 PBAR/S, 14 RFOUT, 15 C8, 16 C4, 17 C2, 18 GND, 19 C1, 20 C0.5, 21 GND

## RFSA2013
designator DA?
VOLTAGE CONTROLLED ATTENUATOR; Manufacturer: Qorvo; PartNumber: RFSA2013; ComponentLink1Description: Product Page; ComponentLink1URL: https://www.qorvo.com/products/p/RFSA2013; ComponentLink2Description: DataSheet; ComponentLink2URL: https://www.qorvo.com/products/d/da001051
footprint QFN17P50_300X300X90L40X34T170N (Quad Flat No-Lead (QFN with Tab), 0.50 mm pitch; square, 4 pin X 4 pin, 3.00 mm L X 3.00 mm W X 0.90 mm H body)
pins: 1 GND, 2 NC, 3 RFIN, 4 NC, 5 GND, 6 GND, 7 GND, 8 GND, 9 NC, 10 RFOUT, 11 NC, 12 GND, 13 GND, 14 VC, 15 VDD, 16 MODE, 17 GND

## SKY12239-11
designator DA?
High IIP3 10 MHz to 1.5 GHz Voltage-Controlled Variable Attenuator; Manufacturer: Skyworks; PartNumber: SKY12239-11; ComponentLink1Description: Product Page; ComponentLink1URL: https://www.skyworksinc.com/en/Products/Attenuators/SKY12239-11; ComponentLink2Description: DataSheet; ComponentLink2URL: https://www.skyworksinc.com/-/media/SkyWorks/Documents/Products/2601-2700/SKY12239_11_203556C.pdf
footprint SKY12239-11 (Skyworks SKY12239-11 3.8x3.8x1.1 mm)
pins: 1 RF_IN, 2 V_SUPPLY, 3 RF_OUT, 4 V_CONTROL, 5 L_OUT, 6 L_IN, 7 GND

## SKY12407-321LF
designator DA?
Differential Digital Attenuator; Manufacturer: Skyworks; PartNumber: SKY12407-321LF; ComponentLink1Description: Product Page; ComponentLink1URL: https://www.skyworksinc.com/en/Products/Attenuators/SKY12407-321LF; ComponentLink2Description: DataSheet; ComponentLink2URL: https://www.skyworksinc.com/-/media/SkyWorks/Documents/Products/401-500/200935F.pdf
footprint SKY12407-321LF
pins: 1 RFIP, 2 CBP1, 3 RFIN, 4 GND, 5 GND, 6 GND, 7 RFON, 8 CBP2, 9 RFOP, 10 Vctrl2, 11 GND, 12 Vctrl1, 13 GND

## TGL2223-SM
designator DA?
0.1-31 GHz 5-Bit Attenuator, 0.5 dB Steps, Packaged; Manufacturer: Qorvo; PartNumber: TGL2223-SM; ComponentLink1Description: Product Page; ComponentLink1URL: https://www.qorvo.com/products/p/TGL2223-SM; ComponentLink2Description: DataSheet; ComponentLink2URL: https://www.qorvo.com/products/d/da005010
footprint TGL2223-SM
pins: 1 GND, 2 RFIN, 3 GND, 4 B0, 5 B2, 6 B5, 7 B6, 8 GND, 9 RFOUT, 10 GND, 11 B7, 12 B4, 13 B3, 14 B1, 15 GND
text: dB

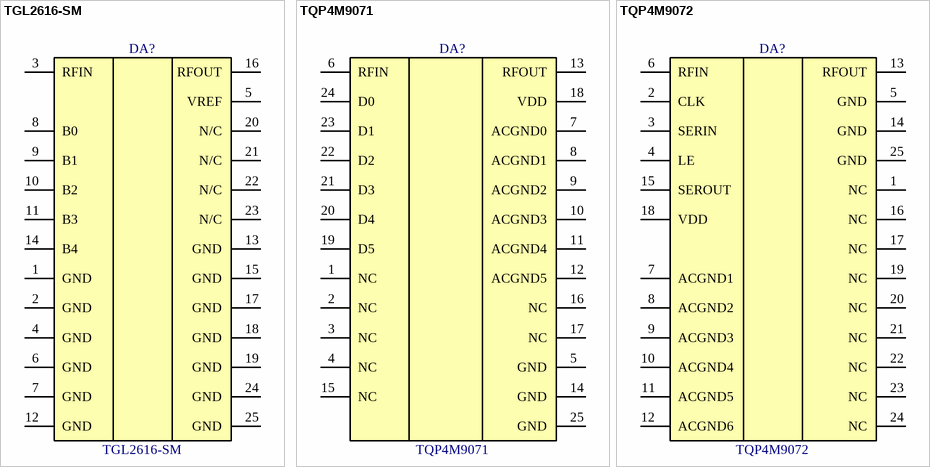
[diagram p39: symbols TGL2616-SM to TQP4M9072]

## TGL2616-SM
designator DA?
10-20 GHz 5-Bit Attenuator; Manufacturer: Qorvo; PartNumber: TGL2616-SM; ComponentLink1Description: Product Page; ComponentLink1URL: https://www.qorvo.com/products/p/TGL2616-SM; ComponentLink2Description: DataSheet; ComponentLink2URL: https://www.qorvo.com/products/d/da005023
footprint TGL2616-SM (Qorvo TGL2616-SM)
pins: 1 GND, 2 GND, 3 RFIN, 4 GND, 5 VREF, 6 GND, 7 GND, 8 B0, 9 B1, 10 B2, 11 B3, 12 GND, 13 GND, 14 B4, 15 GND, 16 RFOUT, 17 GND, 18 GND, 19 GND, 20 N/C, 21 N/C, 22 N/C, 23 N/C, 24 GND, 25 GND

## TQP4M9071
designator DA?
DC - 4 GHz Parallel Controlled, High Linearity Digital Step Attenuator, 6 Bit, 0.5 dB Steps; Manufacturer: Qorvo; PartNumber: TQP4M9071; ComponentLink1Description: Product Page; ComponentLink1URL: https://www.qorvo.com/products/p/TQP4M9071; ComponentLink2Description: DataSheet; ComponentLink2URL: https://www.qorvo.com/products/d/da005601
footprint QFN25P50_400X400X90L40X25T270N (Quad Flat No-Lead (QFN with Tab), 0.50 mm pitch; square, 6 pin X 6 pin, 4.00 mm L X 4.00 mm W X 0.90 mm H body)
pins: 1 NC, 2 NC, 3 NC, 4 NC, 5 GND, 6 RFIN, 7 ACGND0, 8 ACGND1, 9 ACGND2, 10 ACGND3, 11 ACGND4, 12 ACGND5, 13 RFOUT, 14 GND, 15 NC, 16 NC, 17 NC, 18 VDD, 19 D5, 20 D4, 21 D3, 22 D2, 23 D1, 24 D0, 25 GND

## TQP4M9072
designator DA?
DC - 4 GHz Serial Controlled, High Linearity Digital Step Attenuator, 6 Bit, 0.5 dB Steps; Manufacturer: Qorvo; PartNumber: TQP4M9072; ComponentLink1Description: Product Page; ComponentLink1URL: https://www.qorvo.com/products/p/TQP4M9072; ComponentLink2Description: DataSheet; ComponentLink2URL: https://www.qorvo.com/products/d/da005609
footprint QFN25P50_400X400X90L40X25T270N (Quad Flat No-Lead (QFN with Tab), 0.50 mm pitch; square, 6 pin X 6 pin, 4.00 mm L X 4.00 mm W X 0.90 mm H body)
pins: 1 NC, 2 CLK, 3 SERIN, 4 LE, 5 GND, 6 RFIN, 7 ACGND1, 8 ACGND2, 9 ACGND3, 10 ACGND4, 11 ACGND5, 12 ACGND6, 13 RFOUT, 14 GND, 15 SEROUT, 16 NC, 17 NC, 18 VDD, 19 NC, 20 NC, 21 NC, 22 NC, 23 NC, 24 NC, 25 GND


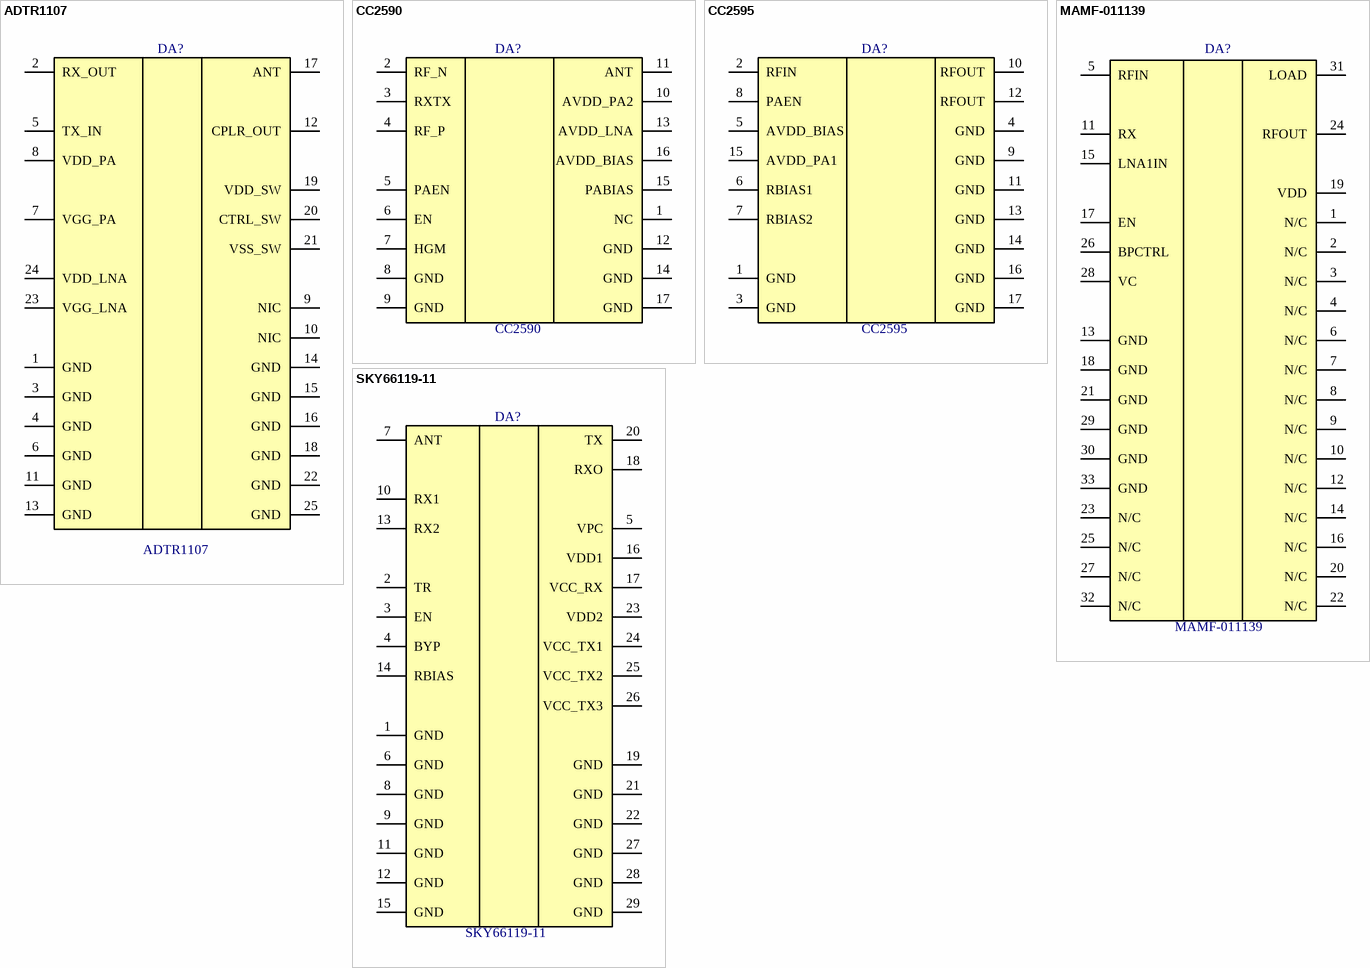
[diagram p40: symbols ADTR1107 to SKY66119-11]

## ADTR1107
designator DA?
6 GHz to 18 GHz, Front-End IC; Manufacturer: Analog Devices; PartNumber: ADTR1107; ComponentLink1Description: Product Page; ComponentLink1URL: https://www.analog.com/en/products/adtr1107.html; ComponentLink2Description: DataSheet; ComponentLink2URL: https://www.analog.com/media/en/technical-documentation/data-sheets/ADTR1107.pdf
footprint QFN65P500X500X113_HS-25N (QFN, 24-Leads, Body 5.00x5.00mm, Pitch 0.65mm, Thermal Pad 3.30x3.30mm, IPC Medium Density)
pins: 1 GND, 2 RX_OUT, 3 GND, 4 GND, 5 TX_IN, 6 GND, 7 VGG_PA, 8 VDD_PA, 9 NIC, 10 NIC, 11 GND, 12 CPLR_OUT, 13 GND, 14 GND, 15 GND, 16 GND, 17 ANT, 18 GND, 19 VDD_SW, 20 CTRL_SW, 21 VSS_SW, 22 GND, 23 VGG_LNA, 24 VDD_LNA, 25 GND

## CC2590
designator DA?
2.4-GHz RF Front End, 14-dBm output power; Manufacturer: Texas Instruments; PartNumber: CC2590; ComponentLink1Description: Product Page; ComponentLink1URL: https://www.ti.com/product/CC2590; ComponentLink2Description: DataSheet; ComponentLink2URL: https://www.ti.com/lit/gpn/cc2590
footprint QFN17P65_400X400X100L55X30T216N (Quad Flat No-Lead (QFN with Tab), 0.65 mm pitch; square, 4 pin X 4 pin, 4.00 mm L X 4.00 mm W X 1.00 mm H body)
pins: 1 NC, 2 RF_N, 3 RXTX, 4 RF_P, 5 PAEN, 6 EN, 7 HGM, 8 GND, 9 GND, 10 AVDD_PA2, 11 ANT, 12 GND, 13 AVDD_LNA, 14 GND, 15 PABIAS, 16 AVDD_BIAS, 17 GND

## CC2595
designator DA?
2.4-GHz RF FRONT END; Manufacturer: Texas Instruments; PartNumber: CC2595; ComponentLink1Description: Product Page; ComponentLink1URL: https://www.ti.com/product/CC2595; ComponentLink2Description: DataSheet; ComponentLink2URL: https://www.ti.com/lit/gpn/cc2595
footprint QFN17P50_300X300X100L40X24T170N (Quad Flat No-Lead (QFN with Tab), 0.50 mm pitch; square, 4 pin X 4 pin, 3.00 mm L X 3.00 mm W X 1.00 mm H body)
pins: 1 GND, 2 RFIN, 3 GND, 4 GND, 5 AVDD_BIAS, 6 RBIAS1, 7 RBIAS2, 8 PAEN, 9 GND, 10 RFOUT, 11 GND, 12 RFOUT, 13 GND, 14 GND, 15 AVDD_PA1, 16 GND, 17 GND

## MAMF-011139
designator DA?
High Power Switch - LNA Module with Bypass 1.4 - 6.0 GHz; Manufacturer: MACOM; PartNumber: MAMF-011139; ComponentLink1Description: Product Page; ComponentLink1URL: https://www.macom.com/products/product-detail/MAMF-011139; ComponentLink2Description: DataSheet; ComponentLink2URL: https://cdn.macom.com/datasheets/MAMF-011139.pdf
footprint QFN50P500X500X160_HS-33N (QFN, 32-Leads, Body 5.00x5.00mm, Pitch 0.50mm, Thermal Pad 3.48x3.58mm, IPC Medium Density)
pins: 1 N/C, 2 N/C, 3 N/C, 4 N/C, 5 RFIN, 6 N/C, 7 N/C, 8 N/C, 9 N/C, 10 N/C, 11 RX, 12 N/C, 13 GND, 14 N/C, 15 LNA1IN, 16 N/C, 17 EN, 18 GND, 19 VDD, 20 N/C, 21 GND, 22 N/C, 23 N/C, 24 RFOUT, 25 N/C, 26 BPCTRL, 27 N/C, 28 VC, 29 GND, 30 GND, 31 LOAD, 32 N/C, 33 GND

## SKY66119-11
designator DA?
460 MHz Transmit/Receive Front-End Module; Manufacturer: Skyworks; PartNumber: SKY66119-11; ComponentLink1Description: ProductPage; ComponentLink1URL: https://www.skyworksinc.com/en/Products/Front-end-Modules/SKY66119-11; ComponentLink2Description: DataSheet; ComponentLink2URL: https://www.skyworksinc.com/-/media/SkyWorks/Documents/Products/2601-2700/SKY66119_11_203652F.pdf
footprint SKY66119-11 (Skyworks QFN, 28-Leads + 4 Corner GND, Body 6.00x6.00mm, Pitch 0.725mm0.75, Thermal Pad 3.875x3.875mm)
pins: 1 GND, 2 TR, 3 EN, 4 BYP, 5 VPC, 6 GND, 7 ANT, 8 GND, 9 GND, 10 RX1, 11 GND, 12 GND, 13 RX2, 14 RBIAS, 15 GND, 16 VDD1, 17 VCC_RX, 18 RXO, 19 GND, 20 TX, 21 GND, 22 GND, 23 VDD2, 24 VCC_TX1, 25 VCC_TX2, 26 VCC_TX3, 27 GND, 28 GND, 29 GND


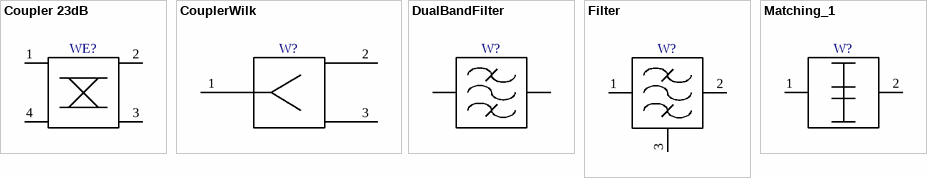
[diagram p41: symbols Coupler 23dB to Matching_1]

## Coupler 23dB
designator WE?, comment Copuler 23dB  (value not drawn)  (net tie, no BOM)
Copuler, 23 dB, diel RO4003, h=0.5mm; RFDescription: Ответвитель направленный
footprint Coupler 23dB (Copuler, 23 dB, diel RO4003, h=0.5mm)
pins: 1, 2, 3, 4

## CouplerWilk
designator W?, comment Wilkinson Coupler  (value not drawn)  (net tie, no BOM)
Wilkinson Coupler diel 7.2GHz, RO4003, h=0.2mm; RFDescription: Делитель кольцевой развязанный
footprint CouplerWilk (Wilkinson Coupler diel 7.2GHz, RO4003, h=0.2mm)
pins: 1, 2, 3

## DualBandFilter
designator W?, comment DualBandFilter 3 pole coupled  (value not drawn)  (net tie, no BOM)
RFDescription: Фильтр полоснопропускающий микрополосковый
footprint DualBandFilter (DualBandFilter on coupled resonators)
pins: 1, 2

## Filter
designator W?  (value not drawn)  (net tie, no BOM)
Bandpass filter, Fc 1.250GHz, BW 75 MHz, type - four pole microstrip cross coupled resonators, diel RO3003, h=0.5mm; RFDescription: Фильтр полоснопропускающий микрополосковый
footprint Filter (Bandpass filter, Fc 1.250GHz, BW 75 MHz, type - four pole microstrip cross coupled resonators, diel RO3003, h=0.5mm)
pins: 1, 2, 3

## Matching_1
designator W?, comment Matching_DA1_in  (value not drawn)  (net tie, no BOM)
Matching_DA1_in / Pad 2 refplane component outline; RFDescription: Цепь согласующая микрополосковая
footprint Matching_DA1_in
pins: 1, 2


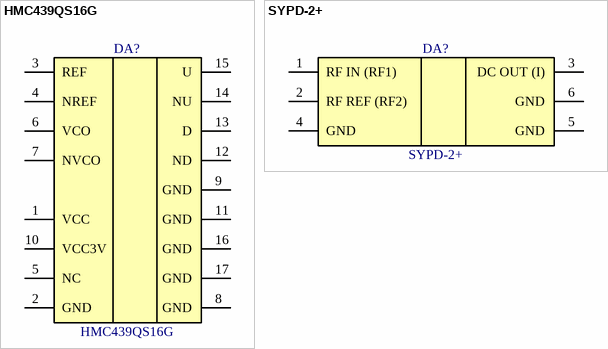
[diagram p42: symbols HMC439QS16G to SYPD-2+]

## HMC439QS16G
designator DA?
HBT DIGITAL PHASE-FREQUENCY DETECTOR, 10 - 1300 MHz; Manufacturer: Analog Devices; PartNumber: HMC439QS16G; ComponentLink1Description: Product Page; ComponentLink1URL: https://www.analog.com/en/products/hmc439.html; ComponentLink2Description: DataSheet; ComponentLink2URL: https://www.analog.com/media/en/technical-documentation/data-sheets/hmc439.pdf
footprint SOP17P64_490X600X175L84X25T230X175N (Small Outline Pkg (SOP with Tab), 0.64 mm pitch; 16 pin, 4.90 mm L X 3.90 mm W X 1.75 mm H body)
pins: 1 VCC, 2 GND, 3 REF, 4 NREF, 5 NC, 6 VCO, 7 NVCO, 8 GND, 9 GND, 10 VCC3V, 11 GND, 12 ND, 13 D, 14 NU, 15 U, 16 GND, 17 GND

## SYPD-2+
designator DA?
Phase Detector 50Ω High Output 10 to 200 MHz; Manufacturer: Mini-Circuits; PartNumber: SYPD-2+; ComponentLink1Description: Product Page; ComponentLink1URL: https://www.minicircuits.com/WebStore/dashboard.html?model=SYPD-2%2B; ComponentLink2Description: DataSheet; ComponentLink2URL: https://www.minicircuits.com/WebStore/dashboardPdf?model=SYPD-2%2B
footprint TTT167 (Mini-Circuits case TTT167)
pins: 1 RF IN (RF1), 2 RF REF (RF2), 3 DC OUT (I), 4 GND, 5 GND, 6 GND


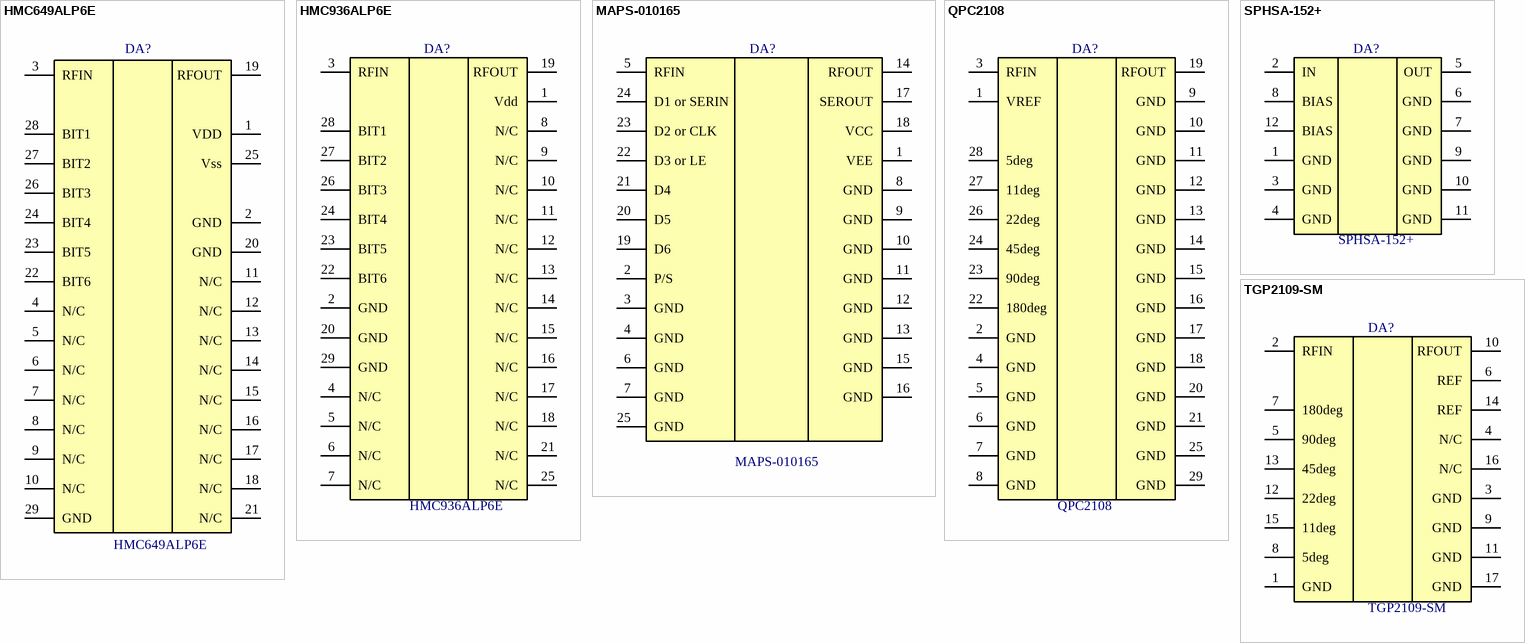
[diagram p43: symbols HMC649ALP6E to TGP2109-SM]

## HMC649ALP6E
designator DA?
GaAs MMIC 6-BIT DIGITAL  PHASE SHIFTER, 3 - 6 GHz; Manufacturer: Analog Devices; PartNumber: HMC649ALP6E; ComponentLink1Description: Product Page; ComponentLink1URL: https://www.analog.com/en/products/hmc649a.html; ComponentLink2Description: DataSheet; ComponentLink2URL: https://www.analog.com/media/en/technical-documentation/data-sheets/hmc649a.pdf
footprint QFN29P65_600X600X100L40X32T470N (Quad Flat No-Lead (QFN with Tab), 0.65 mm pitch; square, 7 pin X 7 pin, 6.00 mm L X 6.00 mm W X 1.00 mm H body)
pins: 1 VDD, 2 GND, 3 RFIN, 4 N/C, 5 N/C, 6 N/C, 7 N/C, 8 N/C, 9 N/C, 10 N/C, 11 N/C, 12 N/C, 13 N/C, 14 N/C, 15 N/C, 16 N/C, 17 N/C, 18 N/C, 19 RFOUT, 20 GND, 21 N/C, 22 BIT6, 23 BIT5, 24 BIT4, 25 Vss, 26 BIT3, 27 BIT2, 28 BIT1, 29 GND

## HMC936ALP6E
designator DA?
GaAs MMIC 6 BIT DIGITAL PHASE SHIFTERS, 1.2 - 1.4 GHz; Manufacturer: Analog Devices; PartNumber: HMC936ALP6E; ComponentLink1Description: Product Page; ComponentLink1URL: https://www.analog.com/en/products/hmc936a.html; ComponentLink2Description: DataSheet; ComponentLink2URL: https://www.analog.com/media/en/technical-documentation/data-sheets/hmc936a.pdf
footprint QFN29P65_600X600X100L40X32T470N (Quad Flat No-Lead (QFN with Tab), 0.65 mm pitch; square, 7 pin X 7 pin, 6.00 mm L X 6.00 mm W X 1.00 mm H body)
pins: 1 Vdd, 2 GND, 3 RFIN, 4 N/C, 5 N/C, 6 N/C, 7 N/C, 8 N/C, 9 N/C, 10 N/C, 11 N/C, 12 N/C, 13 N/C, 14 N/C, 15 N/C, 16 N/C, 17 N/C, 18 N/C, 19 RFOUT, 20 GND, 21 N/C, 22 BIT6, 23 BIT5, 24 BIT4, 25 N/C, 26 BIT3, 27 BIT2, 28 BIT1, 29 GND

## MAPS-010165
designator DA?
Digital Phase Shifter 6-Bit, 3.5 - 6.0 GHz; Manufacturer: MACOM; PartNumber: MAPS-010165; ComponentLink1Description: Product Page; ComponentLink1URL: https://www.macom.com/products/product-detail/MAPS-010165; ComponentLink2Description: DataSheet; ComponentLink2URL: https://cdn.macom.com/datasheets/MAPS-010165.pdf
footprint QFN25P50_400X400X100L40X24T245N (Quad Flat No-Lead (QFN with Tab), 0.50 mm pitch; square, 6 pin X 6 pin, 4.00 mm L X 4.00 mm W X 1.00 mm H body)
pins: 1 VEE, 2 P/S, 3 GND, 4 GND, 5 RFIN, 6 GND, 7 GND, 8 GND, 9 GND, 10 GND, 11 GND, 12 GND, 13 GND, 14 RFOUT, 15 GND, 16 GND, 17 SEROUT, 18 VCC, 19 D6, 20 D5, 21 D4, 22 D3 or LE, 23 D2 or CLK, 24 D1 or SERIN, 25 GND

## QPC2108
designator DA?
2.5-4GHz 6-Bit Digital Phase Shifter; Manufacturer: Qorvo; PartNumber: QPC2108; ComponentLink1Description: Product Page; ComponentLink1URL: https://www.qorvo.com/products/p/QPC2108; ComponentLink2Description: DataSheet; ComponentLink2URL: https://www.qorvo.com/products/d/da006118
footprint PQFN29P65_600X600X84L32X30T470N (Pullback Quad Flat No-Lead (PQFN with Tab), 0.65 mm pitch; square, 7 pin X 7 pin, 6.00 mm L X 6.00 mm W X 0.845 mm H body)
pins: 1 VREF, 2 GND, 3 RFIN, 4 GND, 5 GND, 6 GND, 7 GND, 8 GND, 9 GND, 10 GND, 11 GND, 12 GND, 13 GND, 14 GND, 15 GND, 16 GND, 17 GND, 18 GND, 19 RFOUT, 20 GND, 21 GND, 22 180deg, 23 90deg, 24 45deg, 25 GND, 26 22deg, 27 11deg, 28 5deg, 29 GND

## SPHSA-152+
designator DA?
Phase Shifter 50Ω 360° Voltage Variable 800 to 1500 MHz; Manufacturer: Mini-Circuits; PartNumber: SPHSA-152+; ComponentLink1Description: Product Page; ComponentLink1URL: https://www.minicircuits.com/WebStore/dashboard.html?model=SPHSA-152%2B; ComponentLink2Description: DataSheet; ComponentLink2URL: https://www.minicircuits.com/WebStore/dashboardPdf?model=SPHSA-152%2B
footprint JW1441 (Mini-circuit JW1441)
pins: 1 GND, 2 IN, 3 GND, 4 GND, 5 OUT, 6 GND, 7 GND, 8 BIAS, 9 GND, 10 GND, 11 GND, 12 BIAS

## TGP2109-SM
designator DA?
8-12 6-Bit Digital Phase Shifter; Manufacturer: Qorvo; PartNumber: TGP2109-SM; ComponentLink1Description: Product Page; ComponentLink1URL: https://www.qorvo.com/products/p/TGP2109-SM; ComponentLink2Description: DataSheet; ComponentLink2URL: https://www.qorvo.com/products/d/da005089
footprint TGP2109-SM (Qorvo TGP2109-SM)
pins: 1 GND, 2 RFIN, 3 GND, 4 N/C, 5 90deg, 6 REF, 7 180deg, 8 5deg, 9 GND, 10 RFOUT, 11 GND, 12 22deg, 13 45deg, 14 REF, 15 11deg, 16 N/C, 17 GND


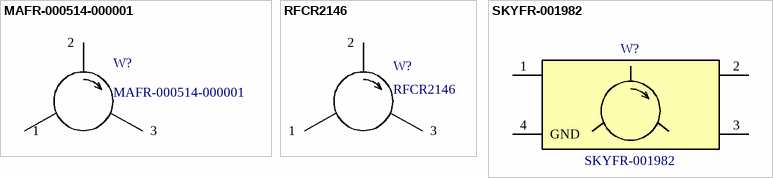
[diagram p44: symbols MAFR-000514-000001 to SKYFR-001982]

## MAFR-000514-000001
designator W?
3100-3500 MHz Single Junction Drop-In Circulator; Manufacturer: Skyworks; Direction: CW; PartNumber: MAFR-000514-000001; ComponentLink1Description: Product Page; ComponentLink1URL: https://www.skyworksinc.com/en/Products/Circulators-and-Isolators/MAFR-000514-000001; ComponentLink2Description: DataSheet; ComponentLink2URL: https://www.skyworksinc.com/-/media/SkyWorks/Documents/Products/1601-1700/201669A.pdf
footprint MAFR-000514-000001 (19X19X7.6 Skyworks Drop-In Circulator)
pins: 1, 2, 3

## RFCR2146
designator W?
Flange Mount Drop-in Circulator 285-325 MHz; Manufacturer: RFCi; Direction: CW; PartNumber: RFCR2146; ComponentLink1Description: Product Page; ComponentLink1URL: https://www.rf-ci.com/circulators/drop-in-circulators/flange-mount-drop-in-circulator-200mhz-to-3000mhz/; ComponentLink2Description: DataSheet; ComponentLink2URL: http://www.rf-ci.com/wp-content/themes/rfci/pdf/Communication_Bands_200_to_3000Mhz/CR2146-OSrA.pdf
footprint RFCI DC-04 (RFCI DC-04 44.5mm Flange Drop-In Package)
pins: 1, 2, 3

## SKYFR-001982
designator W?
1200 to 1400 MHz Single-Junction Robust Lead Circulator; Manufacturer: Skyworks; Direction: CW; PartNumber: SKYFR-001982; ComponentLink1Description: Product Page; ComponentLink1URL: https://www.skyworksinc.com/en/Products/Circulators-and-Isolators/SKYFR-001982; ComponentLink2Description: DataSheet; ComponentLink2URL: https://www.skyworksinc.com/-/media/SkyWorks/Documents/Products/2901-3000/SKYFR-001982_205787A.pdf
footprint SKYFR-001982 (SKYFR-001982 Circulator)
pins: 1, 2, 3, 4 GND


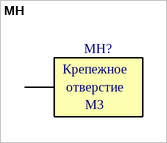
[diagram p45: symbol MH]

## MH
designator MH?  (no BOM)
Mounting Hole, generic; Screw: M3
footprint MH_M3 (Mounting Hole M3 with 8 vias)
pins: 1
text: Крепежное; отверстие


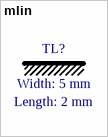
[diagram p46: symbol mlin]

## mlin
designator TL?  Length: 2 mm  Width: 5 mm  (graphical)
Graphical mlin


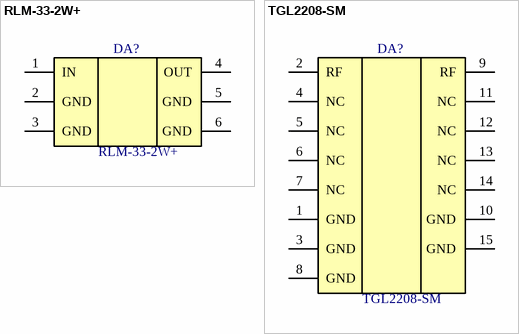
[diagram p47: symbols RLM-33-2W+ to TGL2208-SM]